# Altium schematic symbol library TSW-104-08-G-S-RA.SchLib: 1 symbol
Pins are listed as number, name and electrical type; pins without a type are passive.

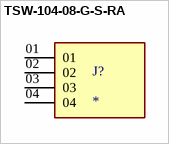
[diagram p0: symbol TSW-104-08-G-S-RA]

## TSW-104-08-G-S-RA
designator J?
MP: TSW-104-08-G-S-RA; MF: Samtec Inc.; Availability: Unavailable; Package: None; Value: *; Price: None
footprint SAMTEC_TSW-104-08-G-S-RA
pins: 01, 02, 03, 04